# Altium footprint library PcbLibrary_power.PcbLib: 31 footprints (part 2 of 2)
Each footprint in its own frame and in the unit in brackets; x right, y up, seen from the top. Pads: shape width x height; smd on the part's side, far side on the other; paste and mask are expansions set on the pad; w line width, h text height; cw(c..) or ccw(c..) is an arc to the next point about the centre after c.
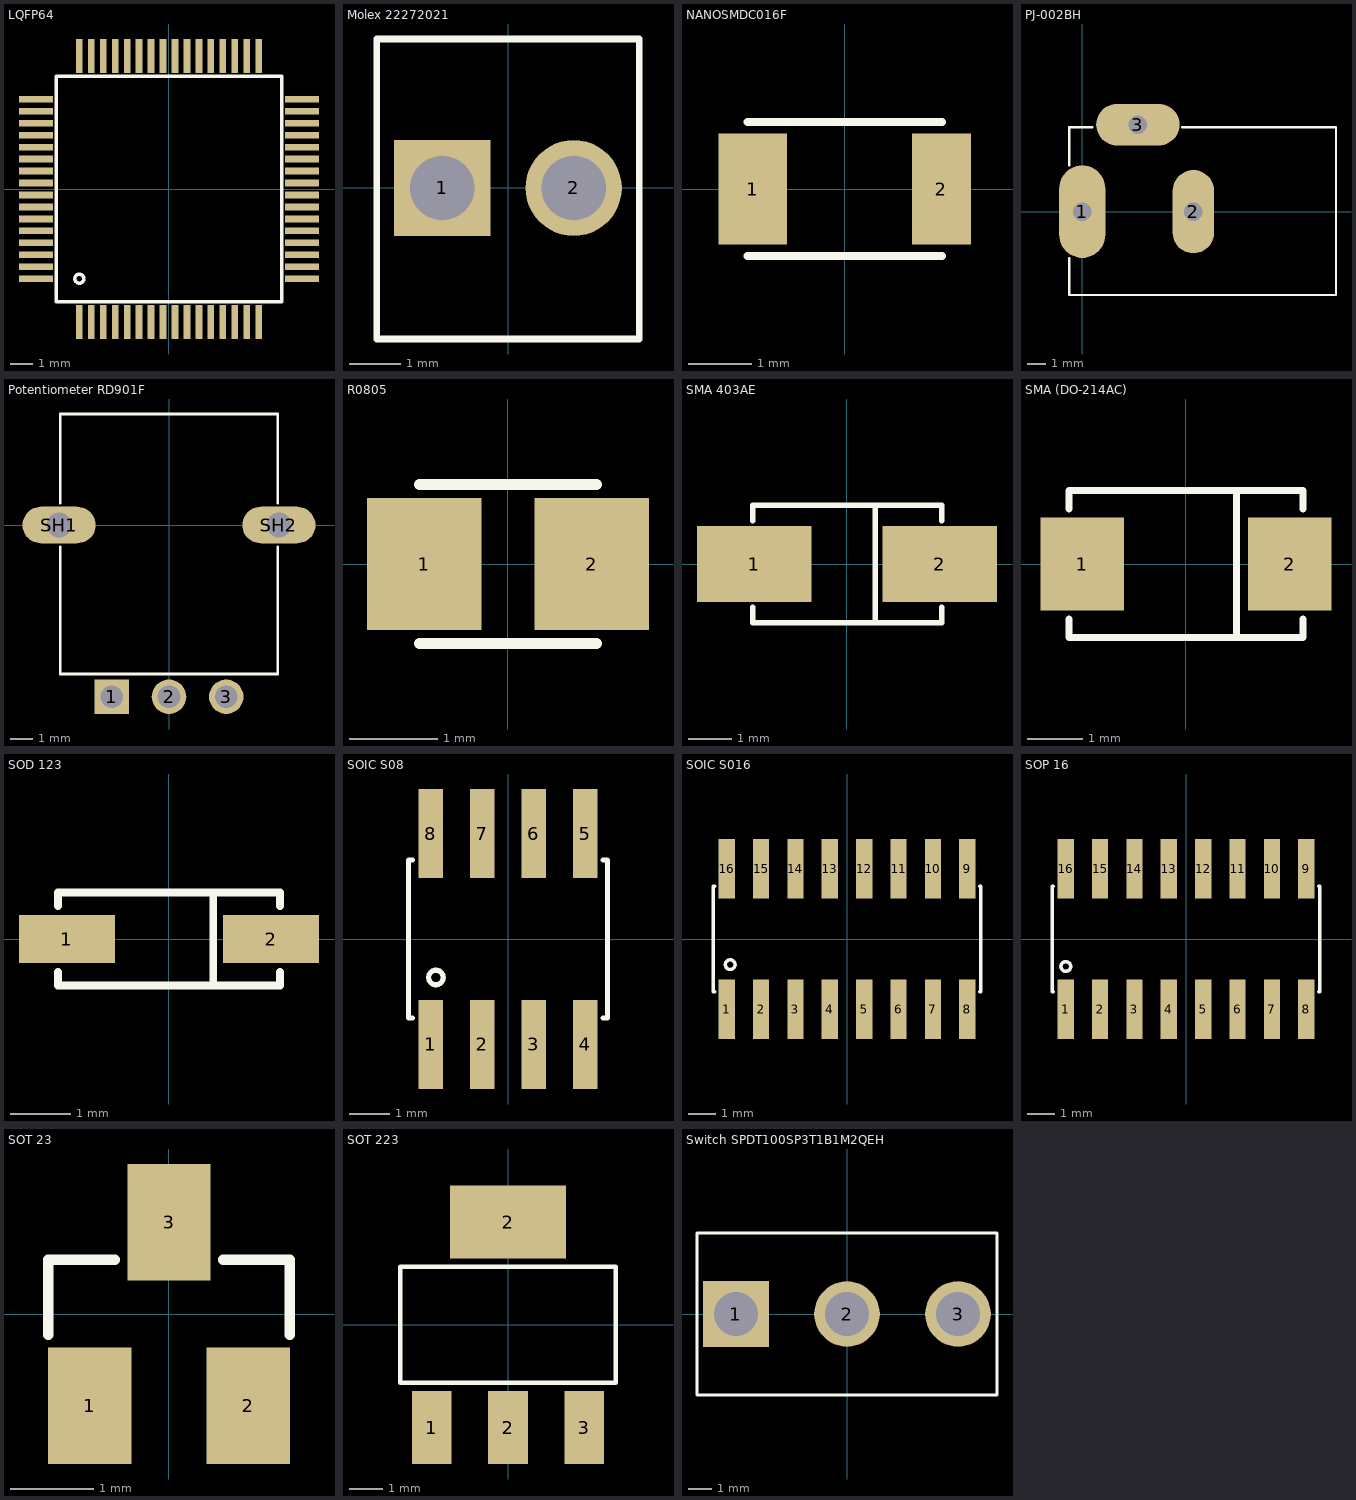
[diagram p1: the footprints below, top view; thin cyan lines are the x and y axes]

## LQFP64 [mm] "LQFP64 SOT 314-2"
pads (64):
  rect 0.3x1.5 smd: 1(-3.975,-5.9) 2(-3.445,-5.9) 3(-2.915,-5.9) 4(-2.385,-5.9) 5(-1.855,-5.9) 6(-1.325,-5.9) 7(-0.795,-5.9) 8(-0.265,-5.9) 9(0.265,-5.9) 10(0.795,-5.9) 11(1.325,-5.9) 12(1.855,-5.9) 13(2.385,-5.9) 14(2.915,-5.9) 15(3.445,-5.9) 16(3.975,-5.9) 33(3.975,5.9) 34(3.445,5.9) 35(2.915,5.9) 36(2.385,5.9) 37(1.855,5.9) 38(1.325,5.9) 39(0.795,5.9) 40(0.265,5.9) 41(-0.265,5.9) 42(-0.795,5.9) 43(-1.325,5.9) 44(-1.855,5.9) 45(-2.385,5.9) 46(-2.915,5.9) 47(-3.445,5.9) 48(-3.975,5.9)
  rect 1.5x0.3 smd: 17(5.9,-3.975) 18(5.9,-3.445) 19(5.9,-2.915) 20(5.9,-2.385) 21(5.9,-1.855) 22(5.9,-1.325) 23(5.9,-0.795) 24(5.9,-0.265) 25(5.9,0.265) 26(5.9,0.795) 27(5.9,1.325) 28(5.9,1.855) 29(5.9,2.385) 30(5.9,2.915) 31(5.9,3.445) 32(5.9,3.975) 49(-5.9,3.975) 50(-5.9,3.445) 51(-5.9,2.915) 52(-5.9,2.385) 53(-5.9,1.855) 54(-5.9,1.325) 55(-5.9,0.795) 56(-5.9,0.265) 57(-5.9,-0.265) 58(-5.9,-0.795) 59(-5.9,-1.325) 60(-5.9,-1.855) 61(-5.9,-2.385) 62(-5.9,-2.915) 63(-5.9,-3.445) 64(-5.9,-3.975)
Top Overlay:
  lines w0.152: -3.783,-3.918 ccw(c-3.975,-3.975) -3.775,-3.975 ; -5,-5 -5,5 5,5 5,-5 -5,-5

## Molex 22272021 [mm] "2 pin connector Molex 22272021"
height 11.7
pads (2):
  rect 1.86x1.86 / inner round 1.86 / far side rect 1.86x1.86 hole 1.24: 1(-1.27,0)
  round 1.86 hole 1.24: 2(1.27,0)
Top Overlay:
  lines w0.127: -2.54,-2.92 2.54,-2.92 2.54,2.88 -2.54,2.88 -2.54,-2.92
3D body "22272021--3DModel-STEP-269445.STEP": height 11.7, standoff -3.56, extent -2.54,-2.92 2.54,2.88

## NANOSMDC016F [mm]
pads (2):
  rect 1.09x1.77 smd: 1(-1.465,0)
  rect 0.94x1.77 smd: 2(1.54,0)
Top Overlay:
  lines w0.127: -1.55,-1.065 1.55,-1.065 ; -1.55,1.065 1.55,1.065
3D body "step_temp.STEP": height 0.67, standoff 0, extent -1.6,-0.793 1.6,0.793

## PJ-002BH [mm] "Power Jack"
pads (3):
  oval 2.5x5 hole 1 square: 1(0,0)
  oval 2.25x4.5 hole 1 square: 2(6,0)
  oval 4.5x2.25 hole 1 square: 3(3,4.7)
Top Overlay:
  lines w0.127: -0.7,-2.5 -0.7,-4.5 13.7,-4.5 13.7,4.55 5.4,4.55 ; -0.7,2.5 -0.7,4.55 0.55,4.55
3D body "step_temp.STEP": height 11, standoff -3.49, extent -0.7,-4.5 13.7,4.9

## Potentiometer RD901F [mm] "Potentiometer RD901F"
height 25
pads (5):
  rect 1.508x1.508 / inner round 1.508 / far side rect 1.508x1.508 hole 1: 1(-2.5,-7.5)
  round 1.508 hole 1: 2(0,-7.5) 3(2.5,-7.5)
  oval 3.2x1.6 hole 1.1 square: SH1(-4.8,0) SH2(4.8,0)
Top Overlay:
  lines w0.127: -4.75,-0.96 -4.75,-6.5 4.75,-6.5 4.75,-0.96 ; -4.75,0.96 -4.75,4.85 4.75,4.85 4.75,0.96
3D body "step_temp.STEP": height 25, standoff -3.5, extent -6,-7.65 6,6

## R0805 [mm] "Resistor 0805 (2012 mm)"
pads (2):
  rect 1.3x1.5 smd: 1(-0.95,0) 2(0.95,0)
Top Overlay:
  lines w0.127: -1,-0.9 1,-0.9 ; -1,0.9 1,0.9
3D body "ERJ-P06D6191V.STEP": height 0.6, standoff 0, extent -1,-0.625 1,0.625

## SMA 403AE [mm] "SMA 403AE"
pads (2):
  rect 2.65x1.75 smd: 1(-2.15,0) 2(2.15,0)
Top Overlay:
  lines w0.127: -2.185,-1 -2.185,-1.362 2.19,-1.362 2.19,-1 ; -2.185,1 -2.185,1.362 2.19,1.362 2.19,1 ; 0.65,-1.332 0.65,1.332

## SMA (DO-214AC) [mm] "TVS diode SMA (DO-214AC)"
pads (2):
  rect 1.52x1.68 smd: 1(-1.88,0) 2(1.88,0)
Top Overlay:
  lines w0.127: -2.125,-1.332 2.125,-1.332 2.125,-1 ; -2.125,-1.325 -2.125,-1 ; -2.125,1 -2.125,1.332 2.125,1.332 2.125,1 ; 0.92,-1.332 0.92,1.332
3D body "SMAJ30A.STEP": height 2.5, standoff 0, extent -2.57,-1.28 2.57,1.28

## SOD 123 [mm] "SOD 123"
pads (2):
  rect 1.6x0.8 smd: 1(-1.7,0) 2(1.7,0)
Top Overlay:
  lines w0.127: -1.85,-0.55 -1.85,-0.775 1.85,-0.775 1.85,-0.55 ; -1.85,0.55 -1.85,0.775 1.85,0.775 1.85,0.55 ; 0.74,-0.775 0.74,0.775

## SOIC S08 [mm] "SOIC S08"
pads (8):
  rect 0.6x2.2 smd: 1(-1.905,-2.6) 2(-0.635,-2.6) 3(0.635,-2.6) 4(1.905,-2.6) 5(1.905,2.6) 6(0.635,2.6) 7(-0.635,2.6) 8(-1.905,2.6)
Top Overlay:
  circle w0.127: c-1.778,-0.949 r0.18
  lines w0.127: -2.355,-1.95 -2.45,-1.95 -2.45,1.95 -2.355,1.95 ; 2.345,-1.95 2.45,-1.95 2.45,1.95 2.345,1.95
3D body "OPA2134UAE4.STEP": height 1.75, standoff 0, extent -2.45,-3 2.45,3

## SOIC S016 [mm] "SOIC S016"
pads (16):
  rect 0.6x2.2 smd: 1(-4.445,-2.6) 2(-3.175,-2.6) 3(-1.905,-2.6) 4(-0.635,-2.6) 5(0.635,-2.6) 6(1.905,-2.6) 7(3.175,-2.6) 8(4.445,-2.6) 9(4.445,2.6) 10(3.175,2.6) 11(1.905,2.6) 12(0.635,2.6) 13(-0.635,2.6) 14(-1.905,2.6) 15(-3.175,2.6) 16(-4.445,2.6)
Top Overlay:
  circle w0.127: c-4.318,-0.949 r0.18
  lines w0.127: -4.895,-1.95 -4.95,-1.95 -4.95,1.95 -4.895,1.95 ; 4.905,-1.95 4.95,-1.95 4.95,1.95 4.905,1.95

## SOP 16 [mm] "SOP 16"
pads (16):
  rect 0.6x2.2 smd: 1(-4.445,-2.6) 2(-3.175,-2.6) 3(-1.905,-2.6) 4(-0.635,-2.6) 5(0.635,-2.6) 6(1.905,-2.6) 7(3.175,-2.6) 8(4.445,-2.6) 9(4.445,2.6) 10(3.175,2.6) 11(1.905,2.6) 12(0.635,2.6) 13(-0.635,2.6) 14(-1.905,2.6) 15(-3.175,2.6) 16(-4.445,2.6)
Top Overlay:
  circle w0.127: c-4.445,-1.016 r0.18
  lines w0.127: -4.9,-1.95 -4.95,-1.95 -4.95,1.95 -4.9,1.95 ; 4.9,-1.95 4.95,-1.95 4.95,1.95 4.9,1.95
3D body "PAM8403.STEP": height 1.75, standoff 0, extent -4.95,-3 4.95,3

## SOT 23 [mm] "SOT 23"
pads (3):
  rect 1x1.4 smd: 1(-0.95,-1.1) 2(0.95,-1.1) 3(0,1.1)
Top Overlay:
  lines w0.127: -1.45,-0.25 -1.45,0.65 -0.65,0.65 ; 0.65,0.65 1.45,0.65 1.45,-0.25
3D body "MCP1703.STEP": height 1.45, standoff 0, extent -1.45,-1.275 1.45,1.275

## SOT 223 [mm] "SOT 223"
pads (4):
  rect 1.2x2.2 smd: 1(-2.3,-3.1) 2(0,-3.1) 3(2.3,-3.1)
  rect 3.5x2.2 smd: 2(0,3.1)
Top Overlay:
  lines w0.127: -3.25,-1.75 -3.25,1.75 3.25,1.75 3.25,-1.75 -3.25,-1.75
3D body "LM7805MP_NOPB.STEP": height 1.8, standoff 0, extent -3.25,-3.499 3.25,3.499

## Switch SPDT100SP3T1B1M2QEH [mm] "Switch SPDT 100SP3T1B1M2QEH"
height 29.69
pads (3):
  rect 2.775x2.775 / inner round 2.775 / far side rect 2.775x2.775 hole 1.85: 1(-4.7,0)
  round 2.775 hole 1.85: 2(0,0) 3(4.7,0)
Top Overlay:
  lines w0.127: -6.35,-3.43 -6.35,3.43 6.35,3.43 6.35,-3.43 -6.35,-3.43
3D body "step_temp.STEP": height 29.42, standoff -5.1, extent -6.35,-3.43 6.35,3.43